# Altium footprint library Package_DFN_QFN.PcbLib: 735 footprints (part 11 of 46)
Each footprint in its own frame and in the unit in brackets; x right, y up, seen from the top. Pads: shape width x height; smd on the part's side, far side on the other; paste and mask are expansions set on the pad; w line width, h text height; cw(c..) or ccw(c..) is an arc to the next point about the centre after c.
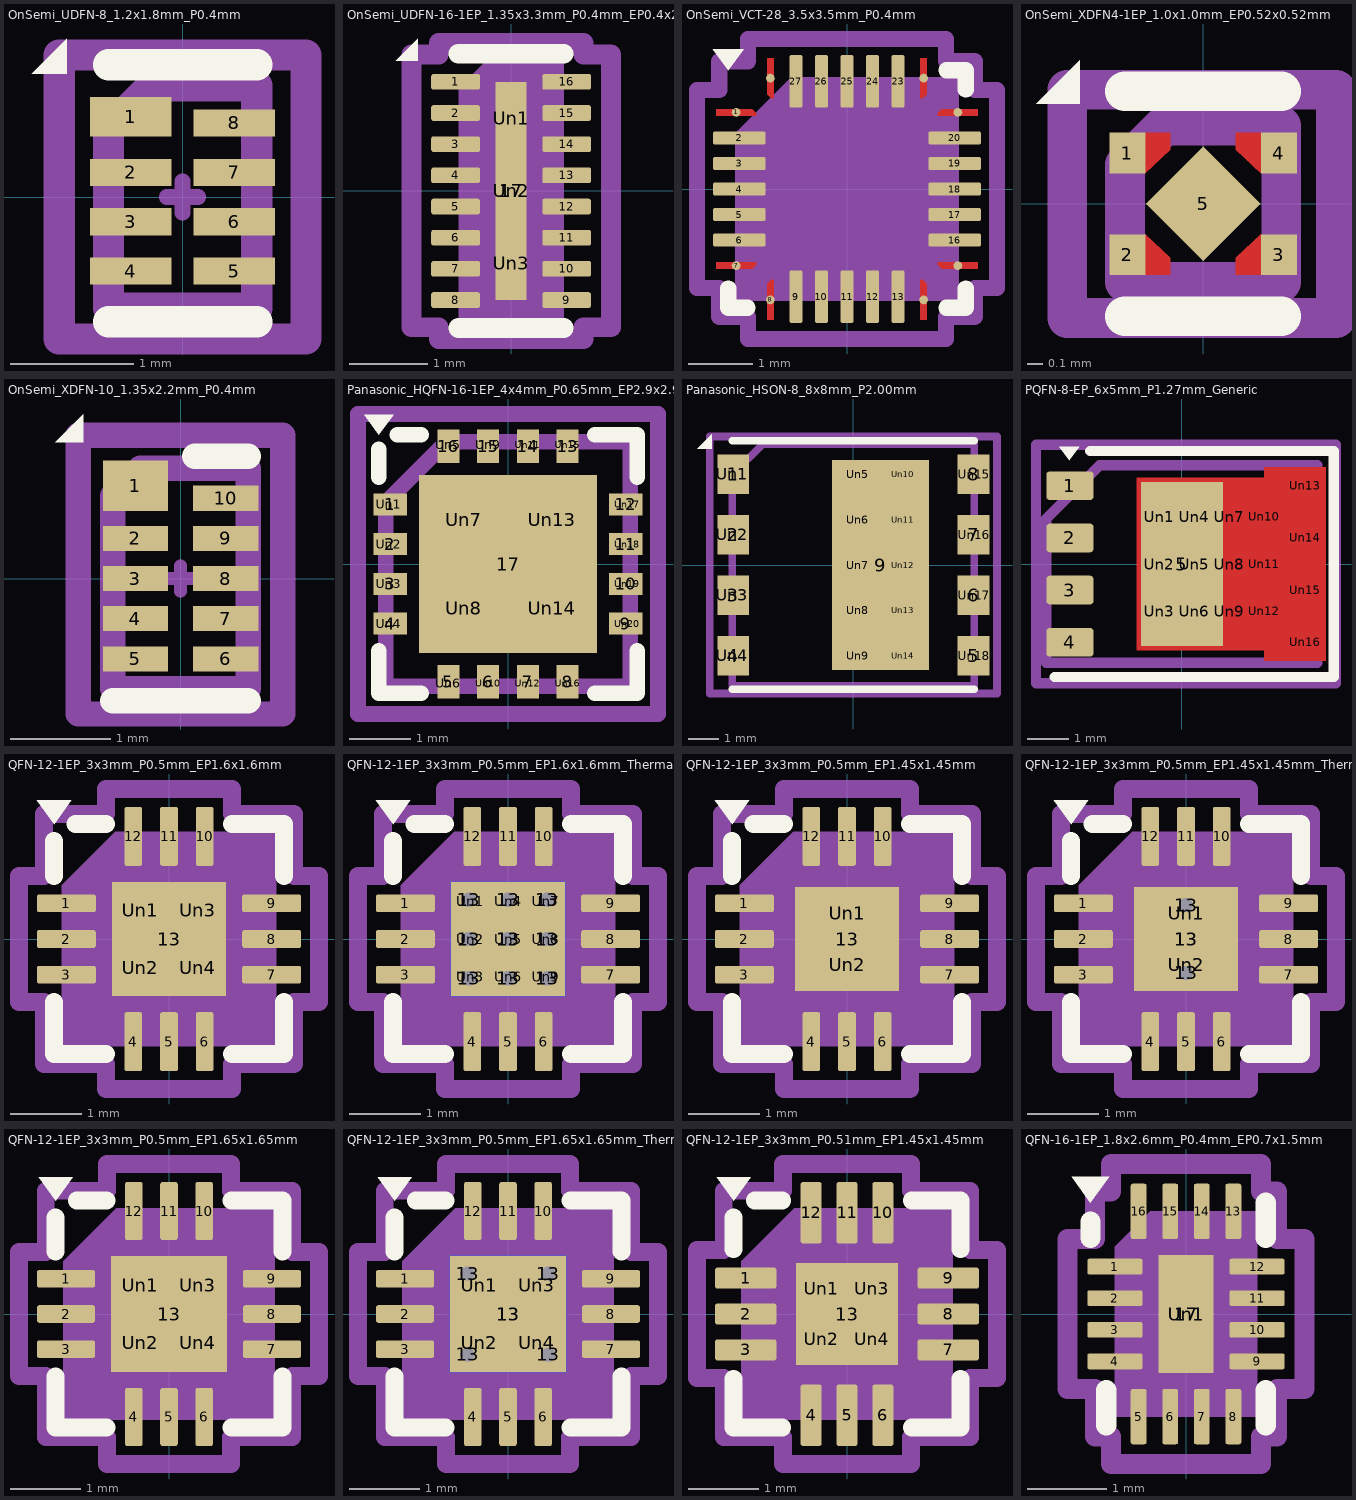
[diagram p10: the footprints below, top view; thin cyan lines are the x and y axes]

## OnSemi_UDFN-8_1.2x1.8mm_P0.4mm [mm] "OnSemi_UDFN-8_1.2x1.8mm_P0.4mm"
pads (8):
  rect 0.66x0.32 smd: 1(-0.42,0.65)
  rect 0.66x0.22 smd: 2(-0.42,0.2) 3(-0.42,-0.2) 4(-0.42,-0.6) 5(0.42,-0.6) 6(0.42,-0.2) 7(0.42,0.2) 8(0.42,0.6)
F.SilkS:
  region: -0.94,1 -1.22,1 -0.94,1.28
  lines w0.254: -0.6,-1.01 0.6,-1.01 ; -0.6,1.07 0.6,1.07
Top Component Center:
  lines w0.127: -0.127,0 0.127,0 -0.127,0 ; 0,-0.127 0,0.127 0,-0.127
Top Assembly:
  lines w0.254: -0.6,-0.9 -0.6,0.55 -0.25,0.9 0.6,0.9 0.6,-0.9 -0.6,-0.9
Top Courtyard:
  lines w0.254: -1,-1.15 -1,1.15 1,1.15 1,-1.15 -1,-1.15
Top Designator:
  text ".Designator" at -1.575,-0.158 h0.7

## OnSemi_UDFN-16-1EP_1.35x3.3mm_P0.4mm_EP0.4x2.8mm [mm] "OnSemi_UDFN-16-1EP_1.35x3.3mm_P0.4mm_EP0.4x2.8mm"
pads (20):
  rrect25% 0.625x0.2 smd: 1(-0.713,1.4) 2(-0.713,1) 3(-0.713,0.6) 4(-0.713,0.2) 5(-0.713,-0.2) 6(-0.713,-0.6) 7(-0.713,-1) 8(-0.713,-1.4) 9(0.713,-1.4) 10(0.713,-1) 11(0.713,-0.6) 12(0.713,-0.2) 13(0.713,0.2) 14(0.713,0.6) 15(0.713,1) 16(0.713,1.4)
  rect 0.4x2.8 smd: 17(0,0)
  rrect25% 0.32x0.75 on Top Paste: Un1(0,0.93) Un2(0,0) Un3(0,-0.93)
F.SilkS:
  region: -1.2,1.67 -1.48,1.67 -1.2,1.95
  lines w0.254: -0.675,-1.76 0.675,-1.76 ; -0.675,1.76 0.675,1.76
Top Component Center:
  lines w0.127: -0.127,0 0.127,0 -0.127,0 ; 0,-0.127 0,0.127 0,-0.127
Top Assembly:
  region: 0.675,-1.65 -0.675,-1.65 -0.675,1.312 -0.337,1.65 0.675,1.65
Top Courtyard:
  lines w0.254: -1.28,-1.75 -0.93,-1.75 -0.93,-1.9 0.93,-1.9 0.93,-1.75 1.28,-1.75 1.28,1.75 0.93,1.75 0.93,1.9 -0.93,1.9 -0.93,1.75 -1.28,1.75 -1.28,-1.75
Top Designator:
  text ".Designator" at -2.251,-0.226 h1

## OnSemi_VCT-28_3.5x3.5mm_P0.4mm [mm] "OnSemi_VCT-28_3.5x3.5mm_P0.4mm"
pads (28):
  round 0.136 smd: 1(-1.737,1.2) 7(-1.737,-1.2) 8(-1.2,-1.737) 14(1.2,-1.737) 15(1.737,-1.2) 21(1.737,1.2) 22(1.2,1.737) 28(-1.2,1.737)
  rrect25% 0.825x0.2 smd: 2(-1.687,0.8) 3(-1.687,0.4) 4(-1.687,0) 5(-1.687,-0.4) 6(-1.687,-0.8) 16(1.687,-0.8) 17(1.687,-0.4) 18(1.687,0) 19(1.687,0.4) 20(1.687,0.8)
  rrect25% 0.2x0.825 smd: 9(-0.8,-1.687) 10(-0.4,-1.687) 11(0,-1.687) 12(0.4,-1.687) 13(0.8,-1.687) 23(0.8,1.687) 24(0.4,1.687) 25(0,1.687) 26(-0.4,1.687) 27(-0.8,1.687)
F.Cu:
  region: -1.425,1.189 -1.425,1.15 -2.05,1.15 -2.05,1.25 -1.486,1.25
  region: -1.425,-1.189 -1.486,-1.25 -2.05,-1.25 -2.05,-1.15 -1.425,-1.15
  region: -1.15,-2.05 -1.25,-2.05 -1.25,-1.486 -1.189,-1.425 -1.15,-1.425
  region: 1.25,-1.486 1.25,-2.05 1.15,-2.05 1.15,-1.425 1.189,-1.425
  region: 2.05,-1.25 1.486,-1.25 1.425,-1.189 1.425,-1.15 2.05,-1.15
  region: 2.05,1.15 1.425,1.15 1.425,1.189 1.486,1.25 2.05,1.25
  region: 1.25,1.486 1.189,1.425 1.15,1.425 1.15,2.05 1.25,2.05
  region: -1.15,1.425 -1.189,1.425 -1.25,1.486 -1.25,2.05 -1.15,2.05
F.SilkS:
  region: -1.86,1.86 -2.1,2.19 -1.62,2.19
  lines w0.254: -1.86,-1.56 -1.86,-1.86 -1.56,-1.86 ; 1.56,-1.86 1.86,-1.86 1.86,-1.56 ; 1.56,1.86 1.86,1.86 1.86,1.56
F.Paste:
  region: -1.425,1.189 -1.425,1.15 -2.05,1.15 -2.05,1.25 -1.486,1.25
  region: -1.425,-1.189 -1.486,-1.25 -2.05,-1.25 -2.05,-1.15 -1.425,-1.15
  region: -1.15,-2.05 -1.25,-2.05 -1.25,-1.486 -1.189,-1.425 -1.15,-1.425
  region: 1.25,-1.486 1.25,-2.05 1.15,-2.05 1.15,-1.425 1.189,-1.425
  region: 2.05,-1.25 1.486,-1.25 1.425,-1.189 1.425,-1.15 2.05,-1.15
  region: 2.05,1.15 1.425,1.15 1.425,1.189 1.486,1.25 2.05,1.25
  region: 1.25,1.486 1.189,1.425 1.15,1.425 1.15,2.05 1.25,2.05
  region: -1.15,1.425 -1.189,1.425 -1.25,1.486 -1.25,2.05 -1.15,2.05
F.Mask:
  region: -1.425,1.189 -1.425,1.15 -2.05,1.15 -2.05,1.25 -1.486,1.25
  region: -1.425,-1.189 -1.486,-1.25 -2.05,-1.25 -2.05,-1.15 -1.425,-1.15
  region: -1.15,-2.05 -1.25,-2.05 -1.25,-1.486 -1.189,-1.425 -1.15,-1.425
  region: 1.25,-1.486 1.25,-2.05 1.15,-2.05 1.15,-1.425 1.189,-1.425
  region: 2.05,-1.25 1.486,-1.25 1.425,-1.189 1.425,-1.15 2.05,-1.15
  region: 2.05,1.15 1.425,1.15 1.425,1.189 1.486,1.25 2.05,1.25
  region: 1.25,1.486 1.189,1.425 1.15,1.425 1.15,2.05 1.25,2.05
  region: -1.15,1.425 -1.189,1.425 -1.25,1.486 -1.25,2.05 -1.15,2.05
Top Component Center:
  lines w0.127: -0.127,0 0.127,0 -0.127,0 ; 0,-0.127 0,0.127 0,-0.127
Top Assembly:
  region: 1.75,-1.75 -1.75,-1.75 -1.75,0.875 -0.875,1.75 1.75,1.75
Top Courtyard:
  lines w0.254: -2.35,-1.55 -2.35,1.55 -2,1.55 -2,2 -1.55,2 -1.55,2.35 1.55,2.35 1.55,2 2,2 2,1.55 2.35,1.55 2.35,-1.55 2,-1.55 2,-2 1.55,-2 1.55,-2.35 -1.55,-2.35 -1.55,-2 -2,-2 -2,-1.55 -2.35,-1.55
Top Designator:
  text ".Designator" at -3.43,-0.344 h1.52

## OnSemi_XDFN4-1EP_1.0x1.0mm_EP0.52x0.52mm [mm] "OnSemi_XDFN4-1EP_1.0x1.0mm_EP0.52x0.52mm"
pads (5):
  rect 0.23x0.26 smd: 1(-0.485,0.325) 2(-0.485,-0.325) 3(0.485,-0.325) 4(0.485,0.325)
  rect 0.52x0.52 smd rot 135: 5(0,0)
F.Cu:
  region: 0.37,0.195 0.21,0.345 0.21,0.455 0.37,0.455
  region: 0.37,-0.455 0.21,-0.455 0.21,-0.345 0.37,-0.195
  region: -0.21,-0.345 -0.21,-0.455 -0.37,-0.455 -0.37,-0.195
  region: -0.21,0.345 -0.37,0.195 -0.37,0.455 -0.21,0.455
F.SilkS:
  region: -0.79,0.64 -1.07,0.64 -0.79,0.92
  lines w0.254: -0.5,-0.72 0.5,-0.72 ; -0.5,0.72 0.5,0.72
F.Paste:
  region: 0.37,0.195 0.21,0.345 0.21,0.455 0.37,0.455
  region: 0.37,-0.455 0.21,-0.455 0.21,-0.345 0.37,-0.195
  region: -0.21,-0.345 -0.21,-0.455 -0.37,-0.455 -0.37,-0.195
  region: -0.21,0.345 -0.37,0.195 -0.37,0.455 -0.21,0.455
F.Mask:
  region: 0.37,0.195 0.21,0.345 0.21,0.455 0.37,0.455
  region: 0.37,-0.455 0.21,-0.455 0.21,-0.345 0.37,-0.195
  region: -0.21,-0.345 -0.21,-0.455 -0.37,-0.455 -0.37,-0.195
  region: -0.21,0.345 -0.37,0.195 -0.37,0.455 -0.21,0.455
Top Component Center:
  lines w0.127: -0.127,0 0.127,0 -0.127,0 ; 0,-0.127 0,0.127 0,-0.127
Top Assembly:
  lines w0.254: -0.5,-0.5 0.5,-0.5 0.5,0.5 -0.25,0.5 -0.5,0.25 -0.5,-0.5
Top Courtyard:
  lines w0.254: -0.87,-0.73 0.85,-0.73 0.85,0.73 -0.87,0.73 -0.87,-0.73
Top Designator:
  text ".Designator" at -1.575,-0.158 h0.7
3D body "OnSemi_XDFN4-1EP_1.0x1.0mm_EP0.52x0.52mm.step": height 0.39, standoff 0, extent -0.501,-0.5 0.501,0.5

## OnSemi_XDFN-10_1.35x2.2mm_P0.4mm [mm] "OnSemi_XDFN-10_1.35x2.2mm_P0.4mm"
pads (10):
  rect 0.65x0.5 smd: 1(-0.45,0.925)
  rect 0.65x0.25 smd: 2(-0.45,0.4) 3(-0.45,0) 4(-0.45,-0.4) 5(-0.45,-0.8) 6(0.45,-0.8) 7(0.45,-0.4) 8(0.45,0) 9(0.45,0.4) 10(0.45,0.8)
F.SilkS:
  region: -0.97,1.36 -1.25,1.36 -0.97,1.64
  lines w0.254: -0.675,-1.22 0.675,-1.22 ; 0.14,1.22 0.675,1.22
Top Component Center:
  lines w0.127: -0.127,0 0.127,0 -0.127,0 ; 0,-0.127 0,0.127 0,-0.127
Top Assembly:
  lines w0.254: -0.675,-1.1 0.675,-1.1 0.675,1.1 -0.4,1.1 -0.675,0.825 -0.675,-1.1
Top Courtyard:
  lines w0.254: -1.02,-1.35 1.02,-1.35 1.02,1.43 -1.02,1.43 -1.02,-1.35
Top Designator:
  text ".Designator" at -1.69,-0.17 h0.75

## Panasonic_HQFN-16-1EP_4x4mm_P0.65mm_EP2.9x2.9mm [mm] "Panasonic_HQFN-16-1EP_4x4mm_P0.65mm_EP2.9x2.9mm"
pads (37):
  rect 0.55x0.36 smd: 1(-1.925,0.975) 2(-1.925,0.325) 3(-1.925,-0.325) 4(-1.925,-0.975) 9(1.925,-0.975) 10(1.925,-0.325) 11(1.925,0.325) 12(1.925,0.975)
  rect 0.36x0.55 smd: 5(-0.975,-1.925) 6(-0.325,-1.925) 7(0.325,-1.925) 8(0.975,-1.925) 13(0.975,1.925) 14(0.325,1.925) 15(-0.325,1.925) 16(-0.975,1.925)
  rect 2.9x2.9 smd: 17(0,0)
  rect 0.5x0.36 on Top Paste: Un1(-1.95,0.975) Un2(-1.95,0.325) Un3(-1.95,-0.325) Un4(-1.95,-0.975) Un17(1.95,0.975) Un18(1.95,0.325) Un19(1.95,-0.325) Un20(1.95,-0.975)
  rect 0.36x0.5 on Top Paste: Un5(-0.975,1.95) Un6(-0.975,-1.95) Un9(-0.325,1.95) Un10(-0.325,-1.95) Un11(0.325,1.95) Un12(0.325,-1.95) Un15(0.975,1.95) Un16(0.975,-1.95)
  rect 1.05x1.05 on Top Paste: Un7(-0.725,0.725) Un8(-0.725,-0.725) Un13(0.725,0.725) Un14(0.725,-0.725)
F.SilkS:
  region: -2.11,2.11 -2.35,2.44 -1.87,2.44
  lines w0.254: -2.11,-1.42 -2.11,-2.11 -1.42,-2.11 ; -2.11,1.42 -2.11,1.87 ; -1.81,2.11 -1.42,2.11 ; 1.42,-2.11 2.11,-2.11 2.11,-1.42 ; 1.42,2.11 2.11,2.11 2.11,1.42
Top Component Center:
  lines w0.127: -0.127,0 0.127,0 -0.127,0 ; 0,-0.127 0,0.127 0,-0.127
Top Assembly:
  lines w0.254: -2,-2 -2,1 -1,2 2,2 2,-2 -2,-2
Top Courtyard:
  lines w0.254: -2.45,-2.45 -2.45,2.45 2.45,2.45 2.45,-2.45 -2.45,-2.45
Top Designator:
  text ".Designator" at -3.43,-0.344 h1.52

## Panasonic_HSON-8_8x8mm_P2.00mm [mm] "Panasonic_HSON-8_8x8mm_P2.00mm"
pads (27):
  rect 1.05x1.3 smd: 1(-3.975,3) 2(-3.975,1) 3(-3.975,-1) 4(-3.975,-3) 5(3.975,-3) 6(3.975,-1) 7(3.975,1) 8(3.975,3)
  rect 3.2x6.94 smd: 9(0.9,0)
  rect 1x1.3 on Top Paste: Un1(-4,3) Un2(-4,1) Un3(-4,-1) Un4(-4,-3) Un15(4,3) Un16(4,1) Un17(4,-1) Un18(4,-3)
  rect 0.9x0.9 on Top Paste: Un5(0.15,3) Un6(0.15,1.5) Un7(0.15,0) Un8(0.15,-1.5) Un9(0.15,-3) Un10(1.65,3) Un11(1.65,1.5) Un12(1.65,0) Un13(1.65,-1.5) Un14(1.65,-3)
F.SilkS:
  region: -4.69,3.84 -5.17,3.84 -4.69,4.32
  lines w0.254: -4,-4.11 4,-4.11 ; -4,4.11 4,4.11
Top Component Center:
  lines w0.127: -0.127,0 0.127,0 -0.127,0 ; 0,-0.127 0,0.127 0,-0.127
Top Assembly:
  lines w0.254: -4,-4 -4,3 -3,4 4,4 4,-4 -4,-4
Top Courtyard:
  lines w0.254: -4.75,-4.25 -4.75,4.25 4.75,4.25 4.75,-4.25 -4.75,-4.25
Top Designator:
  text ".Designator" at -3.43,-0.344 h1.52

## PQFN-8-EP_6x5mm_P1.27mm_Generic [mm] "PQFN-8-EP_6x5mm_P1.27mm_Generic"
pads (21):
  rrect25% 1.15x0.7 smd: 1(-2.725,1.905) 2(-2.725,0.635) 3(-2.725,-0.635) 4(-2.725,-1.905)
  rect 2x4 smd: 5(0,0)
  rect 0.6x0.9 on Top Paste: Un1(-0.55,1.15) Un2(-0.55,0) Un3(-0.55,-1.15) Un4(0.3,1.15) Un5(0.3,0) Un6(0.3,-1.15) Un7(1.15,1.15) Un8(1.15,0) Un9(1.15,-1.15) Un10(2,1.15) Un11(2,0) Un12(2,-1.15)
  rect 0.9x0.6 on Top Paste: Un13(3,1.905) Un14(3,0.635) Un15(3,-0.635) Un16(3,-1.905)
F.Cu:
  region: 3.5,-2.35 2,-2.35 2,-2.1 -1.1,-2.1 -1.1,2.1 2,2.1 2,2.35 3.5,2.35
F.SilkS:
  region: -2.74,2.52 -2.98,2.85 -2.5,2.85
  lines w0.254: -3.1,-2.75 3.7,-2.75 3.7,2.75 -2.23,2.75
F.Mask:
  region: 3.5,-2.35 2,-2.35 2,-2.1 -1.1,-2.1 -1.1,2.1 2,2.1 2,2.35 3.5,2.35
Top Component Center:
  lines w0.127: -0.127,0 0.127,0 -0.127,0 ; 0,-0.127 0,0.127 0,-0.127
Top Assembly:
  lines w0.254: -3.3,-2.4 3.3,-2.4 3.3,2.4 -2,2.4 -3.3,1.1 -3.3,-2.4
Top Courtyard:
  lines w0.254: -3.55,-2.9 3.75,-2.9 3.75,2.9 -3.55,2.9 -3.55,-2.9
Top Designator:
  text ".Designator" at -3.43,-0.344 h1.52

## QFN-12-1EP_3x3mm_P0.5mm_EP1.6x1.6mm [mm] "QFN-12-1EP_3x3mm_P0.5mm_EP1.6x1.6mm"
pads (17):
  rrect25% 0.825x0.25 smd: 1(-1.438,0.5) 2(-1.438,0) 3(-1.438,-0.5) 7(1.438,-0.5) 8(1.438,0) 9(1.438,0.5)
  rrect25% 0.25x0.825 smd: 4(-0.5,-1.438) 5(0,-1.438) 6(0.5,-1.438) 10(0.5,1.438) 11(0,1.438) 12(-0.5,1.438)
  rect 1.6x1.6 smd: 13(0,0)
  rrect25% 0.64x0.64 on Top Paste: Un1(-0.4,0.4) Un2(-0.4,-0.4) Un3(0.4,0.4) Un4(0.4,-0.4)
F.SilkS:
  region: -1.61,1.61 -1.85,1.94 -1.37,1.94
  lines w0.254: -1.61,-0.885 -1.61,-1.61 -0.885,-1.61 ; -1.61,0.885 -1.61,1.37 ; -1.31,1.61 -0.885,1.61 ; 0.885,-1.61 1.61,-1.61 1.61,-0.885 ; 0.885,1.61 1.61,1.61 1.61,0.885
Top Component Center:
  lines w0.127: -0.127,0 0.127,0 -0.127,0 ; 0,-0.127 0,0.127 0,-0.127
Top Assembly:
  region: 1.5,-1.5 -1.5,-1.5 -1.5,0.75 -0.75,1.5 1.5,1.5
Top Courtyard:
  lines w0.254: -2.1,-0.88 -1.75,-0.88 -1.75,-1.75 -0.88,-1.75 -0.88,-2.1 0.88,-2.1 0.88,-1.75 1.75,-1.75 1.75,-0.88 2.1,-0.88 2.1,0.88 1.75,0.88 1.75,1.75 0.88,1.75 0.88,2.1 -0.88,2.1 -0.88,1.75 -1.75,1.75 -1.75,0.88 -2.1,0.88 -2.1,-0.88
Top Designator:
  text ".Designator" at -3.43,-0.344 h1.52
3D body "QFN-12-1EP_3x3mm_P0.5mm_EP1.65x1.65mm.step": height 0.77, standoff 0, extent -1.5,-1.5 1.5,1.5

## QFN-12-1EP_3x3mm_P0.5mm_EP1.6x1.6mm_ThermalVias [mm] "QFN-12-1EP_3x3mm_P0.5mm_EP1.6x1.6mm_ThermalVias"
pads (32):
  rrect25% 0.825x0.25 smd: 1(-1.438,0.5) 2(-1.438,0) 3(-1.438,-0.5) 7(1.438,-0.5) 8(1.438,0) 9(1.438,0.5)
  rrect25% 0.25x0.825 smd: 4(-0.5,-1.438) 5(0,-1.438) 6(0.5,-1.438) 10(0.5,1.438) 11(0,1.438) 12(-0.5,1.438)
  round 0.5 hole 0.2: 13(-0.55,-0.55) 13(-0.55,0) 13(-0.55,0.55) 13(0,-0.55) 13(0,0) 13(0,0.55) 13(0.55,-0.55) 13(0.55,0) 13(0.55,0.55)
  rect 1.6x1.6 smd: 13(0,0)
  rect 1.6x1.6 smd far side: 13(0,0)
  rrect25% 0.46x0.46 on Top Paste: Un1(-0.53,0.53) Un2(-0.53,0) Un3(-0.53,-0.53) Un4(0,0.53) Un5(0,0) Un6(0,-0.53) Un7(0.53,0.53) Un8(0.53,0) Un9(0.53,-0.53)
F.SilkS:
  region: -1.61,1.61 -1.85,1.94 -1.37,1.94
  lines w0.254: -1.61,-0.885 -1.61,-1.61 -0.885,-1.61 ; -1.61,0.885 -1.61,1.37 ; -1.31,1.61 -0.885,1.61 ; 0.885,-1.61 1.61,-1.61 1.61,-0.885 ; 0.885,1.61 1.61,1.61 1.61,0.885
Top Component Center:
  lines w0.127: -0.127,0 0.127,0 -0.127,0 ; 0,-0.127 0,0.127 0,-0.127
Top Assembly:
  region: 1.5,-1.5 -1.5,-1.5 -1.5,0.75 -0.75,1.5 1.5,1.5
Top Courtyard:
  lines w0.254: -2.1,-0.88 -2.1,0.88 -1.75,0.88 -1.75,1.75 -0.88,1.75 -0.88,2.1 0.88,2.1 0.88,1.75 1.75,1.75 1.75,0.88 2.1,0.88 2.1,-0.88 1.75,-0.88 1.75,-1.75 0.88,-1.75 0.88,-2.1 -0.88,-2.1 -0.88,-1.75 -1.75,-1.75 -1.75,-0.88 -2.1,-0.88
Top Designator:
  text ".Designator" at -3.43,-0.344 h1.52
3D body "QFN-12-1EP_3x3mm_P0.5mm_EP1.65x1.65mm.step": height 0.77, standoff 0, extent -1.5,-1.5 1.5,1.5

## QFN-12-1EP_3x3mm_P0.5mm_EP1.45x1.45mm [mm] "QFN-12-1EP_3x3mm_P0.5mm_EP1.45x1.45mm"
pads (15):
  rrect25% 0.825x0.25 smd: 1(-1.438,0.5) 2(-1.438,0) 3(-1.438,-0.5) 7(1.438,-0.5) 8(1.438,0) 9(1.438,0.5)
  rrect25% 0.25x0.825 smd: 4(-0.5,-1.438) 5(0,-1.438) 6(0.5,-1.438) 10(0.5,1.438) 11(0,1.438) 12(-0.5,1.438)
  rect 1.45x1.45 smd: 13(0,0)
  rrect25% 1.17x0.58 on Top Paste: Un1(0,0.36) Un2(0,-0.36)
F.SilkS:
  region: -1.61,1.61 -1.85,1.94 -1.37,1.94
  lines w0.254: -1.61,-0.885 -1.61,-1.61 -0.885,-1.61 ; -1.61,0.885 -1.61,1.37 ; -1.31,1.61 -0.885,1.61 ; 0.885,-1.61 1.61,-1.61 1.61,-0.885 ; 0.885,1.61 1.61,1.61 1.61,0.885
Top Component Center:
  lines w0.127: -0.127,0 0.127,0 -0.127,0 ; 0,-0.127 0,0.127 0,-0.127
Top Assembly:
  region: 1.5,-1.5 -1.5,-1.5 -1.5,0.75 -0.75,1.5 1.5,1.5
Top Courtyard:
  lines w0.254: -2.1,-0.88 -1.75,-0.88 -1.75,-1.75 -0.88,-1.75 -0.88,-2.1 0.88,-2.1 0.88,-1.75 1.75,-1.75 1.75,-0.88 2.1,-0.88 2.1,0.88 1.75,0.88 1.75,1.75 0.88,1.75 0.88,2.1 -0.88,2.1 -0.88,1.75 -1.75,1.75 -1.75,0.88 -2.1,0.88 -2.1,-0.88
Top Designator:
  text ".Designator" at -3.43,-0.344 h1.52
3D body "QFN-12-1EP_3x3mm_P0.5mm_EP1.65x1.65mm.step": height 0.77, standoff 0, extent -1.5,-1.5 1.5,1.5

## QFN-12-1EP_3x3mm_P0.5mm_EP1.45x1.45mm_ThermalVias [mm] "QFN-12-1EP_3x3mm_P0.5mm_EP1.45x1.45mm_ThermalVias"
pads (18):
  rrect25% 0.825x0.25 smd: 1(-1.438,0.5) 2(-1.438,0) 3(-1.438,-0.5) 7(1.438,-0.5) 8(1.438,0) 9(1.438,0.5)
  rrect25% 0.25x0.825 smd: 4(-0.5,-1.438) 5(0,-1.438) 6(0.5,-1.438) 10(0.5,1.438) 11(0,1.438) 12(-0.5,1.438)
  round 0.5 hole 0.2: 13(0,-0.475) 13(0,0.475)
  rect 1.45x1.45 smd: 13(0,0)
  rect 0.5x1.45 smd far side: 13(0,0)
  rrect25% 1.17x0.58 on Top Paste: Un1(0,0.36) Un2(0,-0.36)
F.SilkS:
  region: -1.61,1.61 -1.85,1.94 -1.37,1.94
  lines w0.254: -1.61,-0.885 -1.61,-1.61 -0.885,-1.61 ; -1.61,0.885 -1.61,1.37 ; -1.31,1.61 -0.885,1.61 ; 0.885,-1.61 1.61,-1.61 1.61,-0.885 ; 0.885,1.61 1.61,1.61 1.61,0.885
Top Component Center:
  lines w0.127: -0.127,0 0.127,0 -0.127,0 ; 0,-0.127 0,0.127 0,-0.127
Top Assembly:
  region: 1.5,-1.5 -1.5,-1.5 -1.5,0.75 -0.75,1.5 1.5,1.5
Top Courtyard:
  lines w0.254: -2.1,-0.88 -1.75,-0.88 -1.75,-1.75 -0.88,-1.75 -0.88,-2.1 0.88,-2.1 0.88,-1.75 1.75,-1.75 1.75,-0.88 2.1,-0.88 2.1,0.88 1.75,0.88 1.75,1.75 0.88,1.75 0.88,2.1 -0.88,2.1 -0.88,1.75 -1.75,1.75 -1.75,0.88 -2.1,0.88 -2.1,-0.88
Top Designator:
  text ".Designator" at -3.43,-0.344 h1.52
3D body "QFN-12-1EP_3x3mm_P0.5mm_EP1.65x1.65mm.step": height 0.77, standoff 0, extent -1.5,-1.5 1.5,1.5

## QFN-12-1EP_3x3mm_P0.5mm_EP1.65x1.65mm [mm] "QFN-12-1EP_3x3mm_P0.5mm_EP1.65x1.65mm"
pads (17):
  rrect25% 0.825x0.25 smd: 1(-1.462,0.5) 2(-1.462,0) 3(-1.462,-0.5) 7(1.462,-0.5) 8(1.462,0) 9(1.462,0.5)
  rrect25% 0.25x0.825 smd: 4(-0.5,-1.462) 5(0,-1.462) 6(0.5,-1.462) 10(0.5,1.462) 11(0,1.462) 12(-0.5,1.462)
  rect 1.65x1.65 smd: 13(0,0)
  rrect25% 0.67x0.67 on Top Paste: Un1(-0.41,0.41) Un2(-0.41,-0.41) Un3(0.41,0.41) Un4(0.41,-0.41)
F.SilkS:
  region: -1.61,1.61 -1.85,1.94 -1.37,1.94
  lines w0.254: -1.61,-0.885 -1.61,-1.61 -0.885,-1.61 ; -1.61,0.885 -1.61,1.37 ; -1.31,1.61 -0.885,1.61 ; 0.885,-1.61 1.61,-1.61 1.61,-0.885 ; 0.885,1.61 1.61,1.61 1.61,0.885
Top Component Center:
  lines w0.127: -0.127,0 0.127,0 -0.127,0 ; 0,-0.127 0,0.127 0,-0.127
Top Assembly:
  region: 1.5,-1.5 -1.5,-1.5 -1.5,0.75 -0.75,1.5 1.5,1.5
Top Courtyard:
  lines w0.254: -2.13,-0.88 -2.13,0.88 -1.75,0.88 -1.75,1.75 -0.88,1.75 -0.88,2.13 0.88,2.13 0.88,1.75 1.75,1.75 1.75,0.88 2.13,0.88 2.13,-0.88 1.75,-0.88 1.75,-1.75 0.88,-1.75 0.88,-2.13 -0.88,-2.13 -0.88,-1.75 -1.75,-1.75 -1.75,-0.88 -2.13,-0.88
Top Designator:
  text ".Designator" at -3.43,-0.344 h1.52
3D body "QFN-12-1EP_3x3mm_P0.5mm_EP1.65x1.65mm.step": height 0.77, standoff 0, extent -1.5,-1.5 1.5,1.5

## QFN-12-1EP_3x3mm_P0.5mm_EP1.65x1.65mm_ThermalVias [mm] "QFN-12-1EP_3x3mm_P0.5mm_EP1.65x1.65mm_ThermalVias"
pads (22):
  rrect25% 0.825x0.25 smd: 1(-1.462,0.5) 2(-1.462,0) 3(-1.462,-0.5) 7(1.462,-0.5) 8(1.462,0) 9(1.462,0.5)
  rrect25% 0.25x0.825 smd: 4(-0.5,-1.462) 5(0,-1.462) 6(0.5,-1.462) 10(0.5,1.462) 11(0,1.462) 12(-0.5,1.462)
  round 0.5 hole 0.2: 13(-0.575,-0.575) 13(-0.575,0.575) 13(0.575,-0.575) 13(0.575,0.575)
  rect 1.65x1.65 smd: 13(0,0)
  rect 1.65x1.65 smd far side: 13(0,0)
  rrect25% 0.71x0.71 on Top Paste: Un1(-0.41,0.41) Un2(-0.41,-0.41) Un3(0.41,0.41) Un4(0.41,-0.41)
F.SilkS:
  region: -1.61,1.61 -1.85,1.94 -1.37,1.94
  lines w0.254: -1.61,-0.885 -1.61,-1.61 -0.885,-1.61 ; -1.61,0.885 -1.61,1.37 ; -1.31,1.61 -0.885,1.61 ; 0.885,-1.61 1.61,-1.61 1.61,-0.885 ; 0.885,1.61 1.61,1.61 1.61,0.885
Top Component Center:
  lines w0.127: -0.127,0 0.127,0 -0.127,0 ; 0,-0.127 0,0.127 0,-0.127
Top Assembly:
  region: 1.5,-1.5 -1.5,-1.5 -1.5,0.75 -0.75,1.5 1.5,1.5
Top Courtyard:
  lines w0.254: -2.13,-0.88 -2.13,0.88 -1.75,0.88 -1.75,1.75 -0.88,1.75 -0.88,2.13 0.88,2.13 0.88,1.75 1.75,1.75 1.75,0.88 2.13,0.88 2.13,-0.88 1.75,-0.88 1.75,-1.75 0.88,-1.75 0.88,-2.13 -0.88,-2.13 -0.88,-1.75 -1.75,-1.75 -1.75,-0.88 -2.13,-0.88
Top Designator:
  text ".Designator" at -3.43,-0.344 h1.52
3D body "QFN-12-1EP_3x3mm_P0.5mm_EP1.65x1.65mm.step": height 0.77, standoff 0, extent -1.5,-1.5 1.5,1.5

## QFN-12-1EP_3x3mm_P0.51mm_EP1.45x1.45mm [mm] "QFN-12-1EP_3x3mm_P0.51mm_EP1.45x1.45mm"
pads (17):
  rrect25% 0.875x0.3 smd: 1(-1.438,0.51) 2(-1.438,0) 3(-1.438,-0.51) 7(1.438,-0.51) 8(1.438,0) 9(1.438,0.51)
  rrect25% 0.3x0.875 smd: 4(-0.51,-1.438) 5(0,-1.438) 6(0.51,-1.438) 10(0.51,1.438) 11(0,1.438) 12(-0.51,1.438)
  rect 1.45x1.45 smd: 13(0,0)
  rrect25% 0.58x0.58 on Top Paste: Un1(-0.36,0.36) Un2(-0.36,-0.36) Un3(0.36,0.36) Un4(0.36,-0.36)
F.SilkS:
  region: -1.61,1.61 -1.85,1.94 -1.37,1.94
  lines w0.254: -1.61,-0.92 -1.61,-1.61 -0.92,-1.61 ; -1.61,0.92 -1.61,1.37 ; -1.31,1.61 -0.92,1.61 ; 0.92,-1.61 1.61,-1.61 1.61,-0.92 ; 0.92,1.61 1.61,1.61 1.61,0.92
Top Component Center:
  lines w0.127: -0.127,0 0.127,0 -0.127,0 ; 0,-0.127 0,0.127 0,-0.127
Top Assembly:
  region: 1.5,-1.5 -1.5,-1.5 -1.5,0.75 -0.75,1.5 1.5,1.5
Top Courtyard:
  lines w0.254: -2.13,-0.91 -1.75,-0.91 -1.75,-1.75 -0.91,-1.75 -0.91,-2.13 0.91,-2.13 0.91,-1.75 1.75,-1.75 1.75,-0.91 2.13,-0.91 2.13,0.91 1.75,0.91 1.75,1.75 0.91,1.75 0.91,2.13 -0.91,2.13 -0.91,1.75 -1.75,1.75 -1.75,0.91 -2.13,0.91 -2.13,-0.91
Top Designator:
  text ".Designator" at -3.43,-0.344 h1.52

## QFN-16-1EP_1.8x2.6mm_P0.4mm_EP0.7x1.5mm [mm] "QFN-16-1EP_1.8x2.6mm_P0.4mm_EP0.7x1.5mm"
pads (18):
  rrect25% 0.7x0.2 smd: 1(-0.9,0.6) 2(-0.9,0.2) 3(-0.9,-0.2) 4(-0.9,-0.6) 9(0.9,-0.6) 10(0.9,-0.2) 11(0.9,0.2) 12(0.9,0.6)
  rrect25% 0.2x0.7 smd: 5(-0.6,-1.3) 6(-0.2,-1.3) 7(0.2,-1.3) 8(0.6,-1.3) 13(0.6,1.3) 14(0.2,1.3) 15(-0.2,1.3) 16(-0.6,1.3)
  rect 0.7x1.5 smd: 17(0,0)
  rrect25% 0.56x1.21 on Top Paste: Un1(0,0)
F.SilkS:
  region: -1.21,1.41 -1.45,1.74 -0.97,1.74
  lines w0.254: -1.21,0.96 -1.21,1.17 ; -1.01,-1.41 -1.01,-0.96 ; 1.01,-1.41 1.01,-0.96 ; 1.01,0.96 1.01,1.41
Top Component Center:
  lines w0.127: -0.127,0 0.127,0 -0.127,0 ; 0,-0.127 0,0.127 0,-0.127
Top Assembly:
  region: 0.9,-1.3 -0.9,-1.3 -0.9,0.85 -0.45,1.3 0.9,1.3
Top Courtyard:
  lines w0.254: -1.5,-0.95 -1.15,-0.95 -1.15,-1.55 -0.95,-1.55 -0.95,-1.9 0.95,-1.9 0.95,-1.55 1.15,-1.55 1.15,-0.95 1.5,-0.95 1.5,0.95 1.15,0.95 1.15,1.55 0.95,1.55 0.95,1.9 -0.95,1.9 -0.95,1.55 -1.15,1.55 -1.15,0.95 -1.5,0.95 -1.5,-0.95
Top Designator:
  text ".Designator" at -2.251,-0.226 h1